# Altium footprint library PcbLib1.PcbLib: 2 footprints
Each footprint in its own frame and in the unit in brackets; x right, y up, seen from the top. Pads: shape width x height; smd on the part's side, far side on the other; paste and mask are expansions set on the pad; w line width, h text height; cw(c..) or ccw(c..) is an arc to the next point about the centre after c.
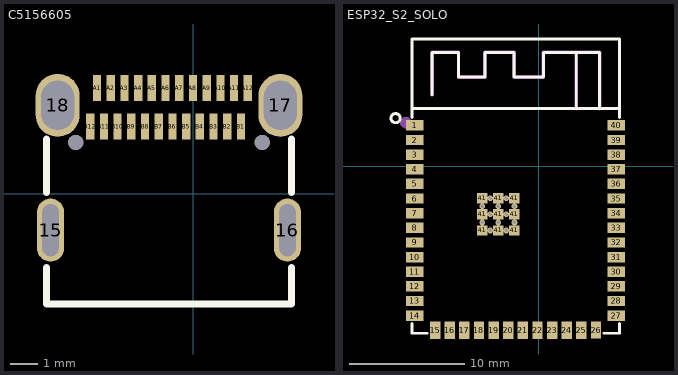
[diagram p0: the footprints below, top view; thin cyan lines are the x and y axes]

## C5156605 [mm] "USB-C-FMAIL"
pads (30):
  oval 1x2.3 hole 0.6 slot 1.9 at 90 deg: 15(-5.209,-1.318) 16(3.431,-1.318)
  oval 1.6x2.3 hole 1.2 slot 1.8 at 90 deg: 17(3.171,3.232) 18(-4.949,3.232)
  rect 0.3x0.95 smd: A1(-3.514,3.858) A2(-3.014,3.858) A3(-2.514,3.858) A4(-2.014,3.858) A5(-1.514,3.858) A6(-1.014,3.858) A7(-0.514,3.858) A8(-0.014,3.858) A9(0.486,3.858) A10(0.986,3.858) A11(1.486,3.858) A12(1.986,3.858) B1(1.736,2.458) B2(1.236,2.458) B3(0.736,2.458) B4(0.236,2.458) B5(-0.264,2.458) B6(-0.764,2.458) B7(-1.264,2.458) B8(-1.764,2.458) B9(-2.264,2.458) B10(-2.764,2.458) B11(-3.264,2.458) B12(-3.764,2.458)
  round 0.55 hole 0.55 unplated: ""(-4.289,1.882) ""(2.511,1.882)
Top Overlay:
  lines w0.254: -5.359,-2.683 -5.359,-4.02 3.581,-4.02 3.581,-2.683 ; -5.359,0.048 -5.359,2.01 ; 3.581,0.048 3.581,2.01
Top Paste:
  drawing of 28 lines, arcs and shapes, not listed
Mechanical 15:
  circle w0.23: c2.511,1.882 r0.115
  circle w0.23: c-4.289,1.882 r0.115

## ESP32_S2_SOLO [mm]
pads (49):
  rect 1.5x0.9 smd: 1(-10.782,3.561) 2(-10.782,2.291) 3(-10.782,1.021) 4(-10.782,-0.249) 5(-10.782,-1.519) 6(-10.782,-2.789) 7(-10.782,-4.059) 8(-10.782,-5.329) 9(-10.782,-6.599) 10(-10.782,-7.869) 11(-10.782,-9.139) 12(-10.782,-10.409) 13(-10.782,-11.679) 14(-10.782,-12.949) 27(6.718,-12.949) 28(6.718,-11.679) 29(6.718,-10.409) 30(6.718,-9.139) 31(6.718,-7.869) 32(6.718,-6.599) 33(6.718,-5.329) 34(6.718,-4.059) 35(6.718,-2.789) 36(6.718,-1.519) 37(6.718,-0.249) 38(6.718,1.021) 39(6.718,2.291) 40(6.718,3.561)
  rect 0.9x1.5 smd: 15(-9.017,-14.229) 16(-7.747,-14.229) 17(-6.477,-14.229) 18(-5.207,-14.229) 19(-3.937,-14.229) 20(-2.667,-14.229) 21(-1.397,-14.229) 22(-0.127,-14.229) 23(1.143,-14.229) 24(2.413,-14.229) 25(3.683,-14.229) 26(4.953,-14.199)
  rect 0.9x0.9 smd: 41(-4.932,-5.559) 41(-4.932,-4.159) 41(-4.932,-2.759) 41(-3.533,-5.559) 41(-3.533,-4.159) 41(-3.533,-2.759) 41(-2.132,-5.559) 41(-2.132,-4.159) 41(-2.132,-2.759)
via -3.532,-3.459 diameter 0.5 hole 0.3
via -3.532,-4.859 diameter 0.5 hole 0.3
via -4.232,-2.759 diameter 0.5 hole 0.3
via -4.932,-3.459 diameter 0.5 hole 0.3
via -4.932,-4.859 diameter 0.5 hole 0.3
via -2.132,-4.859 diameter 0.5 hole 0.3
via -2.132,-3.459 diameter 0.5 hole 0.3
via -2.832,-2.759 diameter 0.5 hole 0.3
via -2.832,-4.159 diameter 0.5 hole 0.3
via -4.232,-4.159 diameter 0.5 hole 0.3
via -4.232,-5.559 diameter 0.5 hole 0.3
via -2.832,-5.559 diameter 0.5 hole 0.3
Top Overlay:
  circle w0.254: c-12.446,4.191 r0.402
  lines w0.254: -11.032,-13.63 -11.032,-14.478 -9.698,-14.478 ; -11.032,4.242 -11.032,11.061 6.968,11.061 ; -11.032,5.021 6.985,5.021 ; -9.271,6.223 -9.271,9.906 -6.985,9.906 -6.985,7.747 -4.699,7.747 -4.699,9.906 -2.159,9.906 -2.159,7.747 0.381,7.747 0.381,9.906 3.233,9.906 3.233,5.021 ; 3.03,9.906 5.265,9.906 5.265,5.021 ; 5.634,-14.478 6.985,-14.478 6.985,-13.63 ; 6.985,4.242 6.985,11.049
Mechanical 15:
  drawing of 2 lines, arcs and shapes, not listed